# Altium integrated library SSK02-FPH-254-A7.IntLib: 1 symbol
Pins are listed as number, name and electrical type; pins without a type are passive.

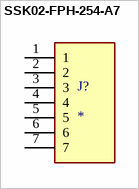
[diagram p0: symbol SSK02-FPH-254-A7]

## SSK02-FPH-254-A7
designator J?
MF: {'manufacturer': u'Same Sky (Formerly CUI Devices)'}; MP: SSK02-FPH-254-A7; Package: None; Price: None; Value: *; Availability: Unavailable
footprint SAMESKY_SSK02-FPH-254-A7
pins: 1, 2, 3, 4, 5, 6, 7